# Altium schematic symbol library Orion-Bridge.SchLib: 37 symbols
Pins are listed as number, name and electrical type; pins without a type are passive.

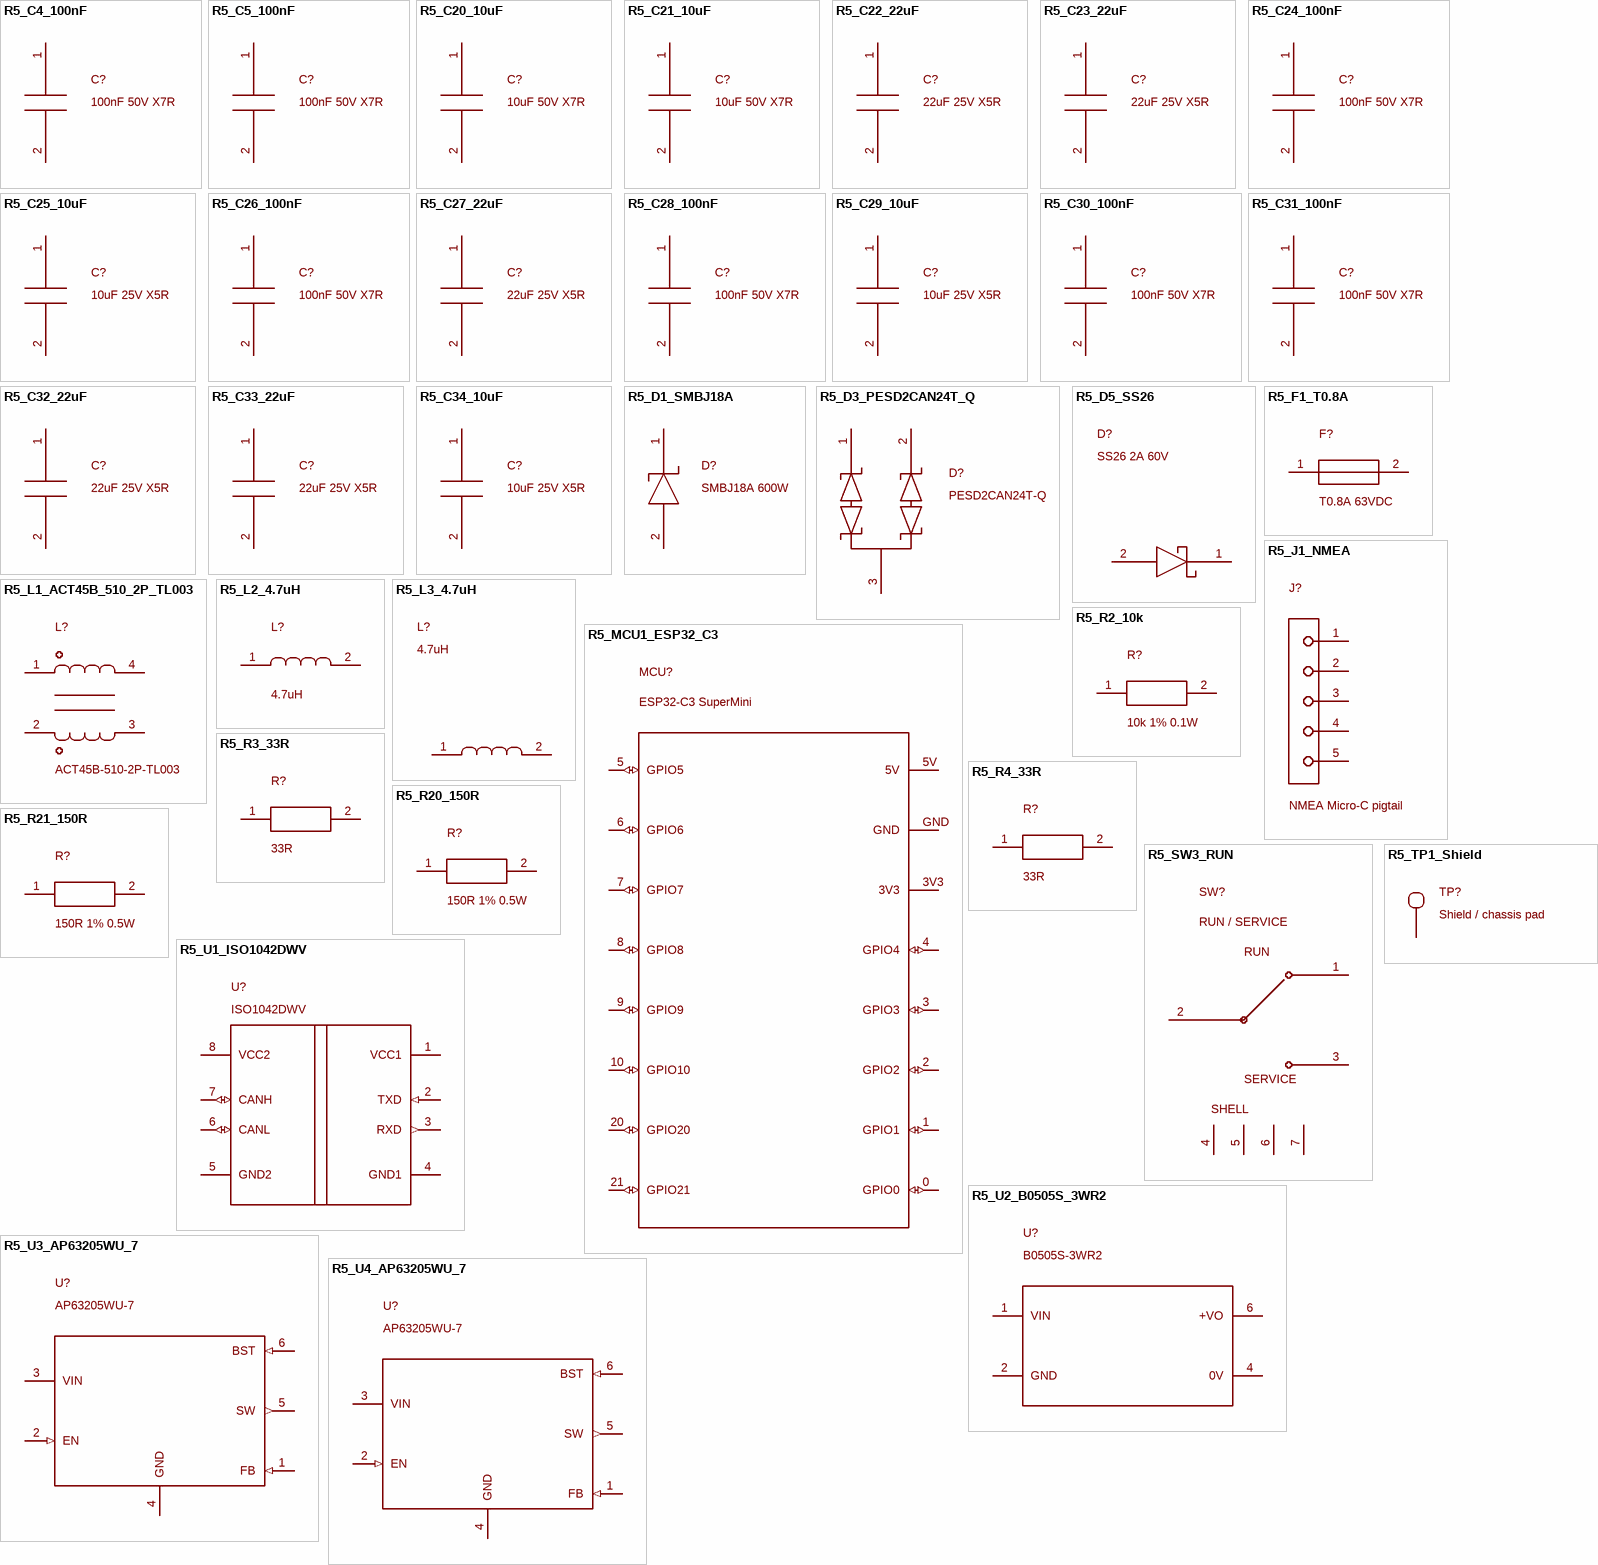
[diagram p0: symbols R5_C4_100nF to R5_U4_AP63205WU_7]

## R5_C4_100nF
designator C?, comment 100nF 50V X7R
100nF 16V X7R - generic specification; manufacturer/MPN not selected; Manufacturer: YAGEO; MPN: CC0603KRX7R9BB104; Manufacturer Part Number: CC0603KRX7R9BB104; Datasheet: https://www.lcsc.com/datasheet/lcsc_datasheet_2211101700_YAGEO-CC0603KRX7R9BB104_C14663.pdf; Supplier 1: LCSC; Supplier Part Number 1: C14663; Footprint Status: R5 placement with enclosure interface
footprint C0603
pins: 1, 2

## R5_C5_100nF
designator C?, comment 100nF 50V X7R
100nF 16V X7R - generic specification; manufacturer/MPN not selected; Manufacturer: YAGEO; MPN: CC0603KRX7R9BB104; Manufacturer Part Number: CC0603KRX7R9BB104; Datasheet: https://www.lcsc.com/datasheet/lcsc_datasheet_2211101700_YAGEO-CC0603KRX7R9BB104_C14663.pdf; Supplier 1: LCSC; Supplier Part Number 1: C14663; Footprint Status: R5 placement with enclosure interface
footprint C0603
pins: 1, 2

## R5_C20_10uF
designator C?, comment 10uF 50V X7R
Manufacturer: Samsung Electro-Mechanics; MPN: CL32B106KBJNNNE; Manufacturer Part Number: CL32B106KBJNNNE; Description: 10uF 50V X7R; Datasheet: https://datasheet.lcsc.com/lcsc/1912112237_Samsung-Electro-Mechanics-CL32B106KBJNNNE_C138687.pdf; Supplier 1: LCSC; Supplier Part Number 1: C138687; Footprint Status: R5 placement with enclosure interface
footprint C1210
pins: 1, 2

## R5_C21_10uF
designator C?, comment 10uF 50V X7R
Manufacturer: Samsung Electro-Mechanics; MPN: CL32B106KBJNNNE; Manufacturer Part Number: CL32B106KBJNNNE; Description: 10uF 50V X7R; Datasheet: https://datasheet.lcsc.com/lcsc/1912112237_Samsung-Electro-Mechanics-CL32B106KBJNNNE_C138687.pdf; Supplier 1: LCSC; Supplier Part Number 1: C138687; Footprint Status: R5 placement with enclosure interface
footprint C1210
pins: 1, 2

## R5_C22_22uF
designator C?, comment 22uF 25V X5R
Manufacturer: Samsung Electro-Mechanics; MPN: CL31A226KAHNNNE; Manufacturer Part Number: CL31A226KAHNNNE; Description: 22uF 25V X5R; Datasheet: https://www.lcsc.com/datasheet/lcsc_datasheet_2304140030_Samsung-Electro-Mechanics-CL31A226KAHNNNE_C12891.pdf; Supplier 1: LCSC; Supplier Part Number 1: C12891; Footprint Status: R5 placement with enclosure interface
footprint C1206
pins: 1, 2

## R5_C23_22uF
designator C?, comment 22uF 25V X5R
Manufacturer: Samsung Electro-Mechanics; MPN: CL31A226KAHNNNE; Manufacturer Part Number: CL31A226KAHNNNE; Description: 22uF 25V X5R; Datasheet: https://www.lcsc.com/datasheet/lcsc_datasheet_2304140030_Samsung-Electro-Mechanics-CL31A226KAHNNNE_C12891.pdf; Supplier 1: LCSC; Supplier Part Number 1: C12891; Footprint Status: R5 placement with enclosure interface
footprint C1206
pins: 1, 2

## R5_C24_100nF
designator C?, comment 100nF 50V X7R
Manufacturer: YAGEO; MPN: CC0603KRX7R9BB104; Manufacturer Part Number: CC0603KRX7R9BB104; Description: 100nF 50V X7R; Datasheet: https://www.lcsc.com/datasheet/lcsc_datasheet_2211101700_YAGEO-CC0603KRX7R9BB104_C14663.pdf; Supplier 1: LCSC; Supplier Part Number 1: C14663; Footprint Status: R5 placement with enclosure interface
footprint C0603
pins: 1, 2

## R5_C25_10uF
designator C?, comment 10uF 25V X5R
Manufacturer: Samsung Electro-Mechanics; MPN: CL21A106KAYNNNE; Manufacturer Part Number: CL21A106KAYNNNE; Description: 10uF 25V X5R; Datasheet: https://www.lcsc.com/datasheet/lcsc_datasheet_2304140030_Samsung-Electro-Mechanics-CL21A106KAYNNNE_C15850.pdf; Supplier 1: LCSC; Supplier Part Number 1: C15850; Footprint Status: R5 placement with enclosure interface
footprint C0805
pins: 1, 2

## R5_C26_100nF
designator C?, comment 100nF 50V X7R
Manufacturer: YAGEO; MPN: CC0603KRX7R9BB104; Manufacturer Part Number: CC0603KRX7R9BB104; Description: 100nF 50V X7R; Datasheet: https://www.lcsc.com/datasheet/lcsc_datasheet_2211101700_YAGEO-CC0603KRX7R9BB104_C14663.pdf; Supplier 1: LCSC; Supplier Part Number 1: C14663; Footprint Status: R5 placement with enclosure interface
footprint C0603
pins: 1, 2

## R5_C27_22uF
designator C?, comment 22uF 25V X5R
Manufacturer: Samsung Electro-Mechanics; MPN: CL31A226KAHNNNE; Manufacturer Part Number: CL31A226KAHNNNE; Description: 22uF 25V X5R; Datasheet: https://www.lcsc.com/datasheet/lcsc_datasheet_2304140030_Samsung-Electro-Mechanics-CL31A226KAHNNNE_C12891.pdf; Supplier 1: LCSC; Supplier Part Number 1: C12891; Footprint Status: R5 placement with enclosure interface
footprint C1206
pins: 1, 2

## R5_C28_100nF
designator C?, comment 100nF 50V X7R
Manufacturer: YAGEO; MPN: CC0603KRX7R9BB104; Manufacturer Part Number: CC0603KRX7R9BB104; Description: 100nF 50V X7R; Datasheet: https://www.lcsc.com/datasheet/lcsc_datasheet_2211101700_YAGEO-CC0603KRX7R9BB104_C14663.pdf; Supplier 1: LCSC; Supplier Part Number 1: C14663; Footprint Status: R5 placement with enclosure interface
footprint C0603
pins: 1, 2

## R5_C29_10uF
designator C?, comment 10uF 25V X5R
Manufacturer: Samsung Electro-Mechanics; MPN: CL21A106KAYNNNE; Manufacturer Part Number: CL21A106KAYNNNE; Description: 10uF 25V X5R; Datasheet: https://www.lcsc.com/datasheet/lcsc_datasheet_2304140030_Samsung-Electro-Mechanics-CL21A106KAYNNNE_C15850.pdf; Supplier 1: LCSC; Supplier Part Number 1: C15850; Footprint Status: R5 placement with enclosure interface
footprint C0805
pins: 1, 2

## R5_C30_100nF
designator C?, comment 100nF 50V X7R
Manufacturer: YAGEO; MPN: CC0603KRX7R9BB104; Manufacturer Part Number: CC0603KRX7R9BB104; Description: 100nF 50V X7R; Datasheet: https://www.lcsc.com/datasheet/lcsc_datasheet_2211101700_YAGEO-CC0603KRX7R9BB104_C14663.pdf; Supplier 1: LCSC; Supplier Part Number 1: C14663; Footprint Status: R5 placement with enclosure interface
footprint C0603
pins: 1, 2

## R5_C31_100nF
designator C?, comment 100nF 50V X7R
Manufacturer: YAGEO; MPN: CC0603KRX7R9BB104; Manufacturer Part Number: CC0603KRX7R9BB104; Description: 100nF 50V X7R; Datasheet: https://www.lcsc.com/datasheet/lcsc_datasheet_2211101700_YAGEO-CC0603KRX7R9BB104_C14663.pdf; Supplier 1: LCSC; Supplier Part Number 1: C14663; Footprint Status: R5 placement with enclosure interface
footprint C0603
pins: 1, 2

## R5_C32_22uF
designator C?, comment 22uF 25V X5R
Manufacturer: Samsung Electro-Mechanics; MPN: CL31A226KAHNNNE; Manufacturer Part Number: CL31A226KAHNNNE; Description: 22uF 25V X5R; Datasheet: https://www.lcsc.com/datasheet/lcsc_datasheet_2304140030_Samsung-Electro-Mechanics-CL31A226KAHNNNE_C12891.pdf; Supplier 1: LCSC; Supplier Part Number 1: C12891; Footprint Status: R5 placement with enclosure interface
footprint C1206
pins: 1, 2

## R5_C33_22uF
designator C?, comment 22uF 25V X5R
Manufacturer: Samsung Electro-Mechanics; MPN: CL31A226KAHNNNE; Manufacturer Part Number: CL31A226KAHNNNE; Description: 22uF 25V X5R; Datasheet: https://www.lcsc.com/datasheet/lcsc_datasheet_2304140030_Samsung-Electro-Mechanics-CL31A226KAHNNNE_C12891.pdf; Supplier 1: LCSC; Supplier Part Number 1: C12891; Footprint Status: R5 placement with enclosure interface
footprint C1206
pins: 1, 2

## R5_C34_10uF
designator C?, comment 10uF 25V X5R
10uF local module5V reservoir after RUN/SERVICE switch; Manufacturer: Samsung Electro-Mechanics; MPN: CL21A106KAYNNNE; Manufacturer Part Number: CL21A106KAYNNNE; Datasheet: https://www.lcsc.com/datasheet/lcsc_datasheet_2304140030_Samsung-Electro-Mechanics-CL21A106KAYNNNE_C15850.pdf; Supplier 1: LCSC; Supplier Part Number 1: C15850; Footprint Status: R5 placement with enclosure interface
footprint C0805
pins: 1, 2

## R5_D1_SMBJ18A
designator D?, comment SMBJ18A 600W
Manufacturer: BORN; MPN: SMBJ18A; Manufacturer Part Number: SMBJ18A; Description: SMBJ18A 600W; Datasheet: https://www.lcsc.com/datasheet/lcsc_datasheet_2304140030_BORN-SMBJ18A_C152104.pdf; Supplier 1: LCSC; Supplier Part Number 1: C152104; Footprint Status: R5 placement with enclosure interface
footprint SMB
pins: 1 K, 2 A

## R5_D3_PESD2CAN24T_Q
designator D?, comment PESD2CAN24T-Q
Manufacturer: Nexperia; MPN: PESD2CAN24T-QR; Manufacturer Part Number: PESD2CAN24T-QR; Description: PESD2CAN24T-Q; Datasheet: https://assets.nexperia.com/documents/data-sheet/PESD2CAN24T-Q.pdf; Supplier 1: LCSC; Supplier Part Number 1: C28933048; Footprint Status: R5 placement with enclosure interface
footprint SOT23_NEXPERIA_REFLOW
pins: 1 K1, 2 K2, 3 CC

## R5_D5_SS26
designator D?, comment SS26 2A 60V
Manufacturer: MDD(Microdiode Semiconductor); MPN: SS26; Manufacturer Part Number: SS26; Description: SS26 2A 60V; Datasheet: https://www.lcsc.com/datasheet/lcsc_datasheet_2407101107_MDD-Microdiode-Semiconductor-SS26_C14238.pdf; Supplier 1: LCSC; Supplier Part Number 1: C14238; Footprint Status: R5 placement with enclosure interface
footprint SMA
pins: 1 K, 2 A

## R5_F1_T0.8A
designator F?, comment T0.8A 63VDC
0.8 A slow-blow SMD ceramic fuse, 63 VDC, 50 A interrupt rating; Manufacturer: BOURNS; MPN: SF-1206S080-2; Manufacturer Part Number: SF-1206S080-2; Datasheet: https://wmsc.lcsc.com/wmsc/upload/file/pdf/v2/lcsc/2304140030_BOURNS-SF-1206S080-2_C3032873.pdf; Supplier 1: LCSC; Supplier Part Number 1: C3032873; Footprint Status: R5 placement with enclosure interface
footprint BOURNS_SF1206S
pins: 1, 2

## R5_J1_NMEA
designator J?, comment NMEA Micro-C pigtail
Five direct wire-solder pads for a separately selected Micro-C cable; this is a PCB interface, not an invented connector MPN or face view; Footprint Status: R5 placement with enclosure interface
footprint PIGTAIL_5_P3_D1P3
pins: 1 SHIELD, 2 NET-S, 3 NET-C, 4 CAN-H, 5 CAN-L

## R5_L1_ACT45B_510_2P_TL003
designator L?, comment ACT45B-510-2P-TL003
Manufacturer: TDK; MPN: ACT45B-510-2P-TL003; Manufacturer Part Number: ACT45B-510-2P-TL003; Description: ACT45B-510-2P-TL003; Datasheet: https://www.lcsc.com/datasheet/lcsc_datasheet_1811151430_TDK-ACT45B-510-2P-TL003_C76584.pdf; Supplier 1: LCSC; Supplier Part Number 1: C76584; Footprint Status: R5 placement with enclosure interface
footprint ACT45B
pins: 1 H_EXT, 2 L_EXT, 3 L_IC, 4 H_IC

## R5_L2_4.7uH
designator L?, comment 4.7uH
Manufacturer: Sunlord; MPN: SWPA4030S4R7MT; Manufacturer Part Number: SWPA4030S4R7MT; Description: 4.7uH; Datasheet: https://www.lcsc.com/datasheet/lcsc_datasheet_2310251551_Sunlord-SWPA4030S4R7MT_C57269.pdf; Supplier 1: LCSC; Supplier Part Number 1: C57269; Footprint Status: R5 placement with enclosure interface
footprint SUNLORD_SWPA4030
pins: 1, 2

## R5_L3_4.7uH
designator L?, comment 4.7uH
Manufacturer: Sunlord; MPN: SWPA4030S4R7MT; Manufacturer Part Number: SWPA4030S4R7MT; Description: 4.7uH; Datasheet: https://www.lcsc.com/datasheet/lcsc_datasheet_2310251551_Sunlord-SWPA4030S4R7MT_C57269.pdf; Supplier 1: LCSC; Supplier Part Number 1: C57269; Footprint Status: R5 placement with enclosure interface
footprint SUNLORD_SWPA4030
pins: 1, 2

## R5_MCU1_ESP32_C3
designator MCU?, comment ESP32-C3 SuperMini
User-selected C3 SuperMini; original onboard USB/BOOT/RESET; direct castellated solder mounting; Manufacturer: Meshnology (seller brand; OEM undisclosed); MPN: ESP32-C3 SuperMini / ASIN B0FN4F6244; Manufacturer Part Number: ESP32-C3 SuperMini / ASIN B0FN4F6244; Datasheet: https://www.amazon.de/4PCS-Supermini-ESP32-C3-Entwicklungsboard/dp/B0FN4F6244; Footprint Status: R5 placement with enclosure interface
footprint SUPERC3_B0FN4F6244_CAST16_SMD
pins: 0 GPIO0 (io), 1 GPIO1 (io), 2 GPIO2 (io), 3 GPIO3 (io), 3V3 (power), 4 GPIO4 (io), 5 GPIO5 (io), 5V (power), 6 GPIO6 (io), 7 GPIO7 (io), 8 GPIO8 (io), 9 GPIO9 (io), 10 GPIO10 (io), 20 GPIO20 (io), 21 GPIO21 (io), GND (power)

## R5_R2_10k
designator R?, comment 10k 1% 0.1W
10k - generic specification; manufacturer/MPN not selected; Manufacturer: UNI-ROYAL(Uniroyal Elec); MPN: 0603WAF1002T5E; Manufacturer Part Number: 0603WAF1002T5E; Datasheet: https://www.lcsc.com/datasheet/lcsc_datasheet_2206010045_UNI-ROYAL-Uniroyal-Elec-0603WAF1002T5E_C25804.pdf; Supplier 1: LCSC; Supplier Part Number 1: C25804; Footprint Status: R5 placement with enclosure interface
footprint R0603
pins: 1, 2

## R5_R3_33R
designator R?, comment 33R
33R - generic specification; manufacturer/MPN not selected; Manufacturer: UNI-ROYAL(Uniroyal Elec); MPN: 0603WAF330JT5E; Manufacturer Part Number: 0603WAF330JT5E; Datasheet: https://www.lcsc.com/datasheet/lcsc_datasheet_2206010116_UNI-ROYAL-Uniroyal-Elec-0603WAF330JT5E_C23140.pdf; Supplier 1: LCSC; Supplier Part Number 1: C23140; Footprint Status: R5 placement with enclosure interface
footprint R0603
pins: 1, 2

## R5_R4_33R
designator R?, comment 33R
33R - generic specification; manufacturer/MPN not selected; Manufacturer: UNI-ROYAL(Uniroyal Elec); MPN: 0603WAF330JT5E; Manufacturer Part Number: 0603WAF330JT5E; Datasheet: https://www.lcsc.com/datasheet/lcsc_datasheet_2206010116_UNI-ROYAL-Uniroyal-Elec-0603WAF330JT5E_C23140.pdf; Supplier 1: LCSC; Supplier Part Number 1: C23140; Footprint Status: R5 placement with enclosure interface
footprint R0603
pins: 1, 2

## R5_R20_150R
designator R?, comment 150R 1% 0.5W
Manufacturer: SEI(Stackpole Elec); MPN: RNCP1206FTD150R; Manufacturer Part Number: RNCP1206FTD150R; Description: 150R 1% 0.5W; Datasheet: https://wmsc.lcsc.com/wmsc/upload/file/pdf/v2/lcsc/2404111532_SEI-Stackpole-Elec-RNCP1206FTD150R_C4258541.pdf; Supplier 1: LCSC; Supplier Part Number 1: C4258541; Footprint Status: R5 placement with enclosure interface
footprint R1206
pins: 1, 2

## R5_R21_150R
designator R?, comment 150R 1% 0.5W
Manufacturer: SEI(Stackpole Elec); MPN: RNCP1206FTD150R; Manufacturer Part Number: RNCP1206FTD150R; Description: 150R 1% 0.5W; Datasheet: https://wmsc.lcsc.com/wmsc/upload/file/pdf/v2/lcsc/2404111532_SEI-Stackpole-Elec-RNCP1206FTD150R_C4258541.pdf; Supplier 1: LCSC; Supplier Part Number 1: C4258541; Footprint Status: R5 placement with enclosure interface
footprint R1206
pins: 1, 2

## R5_SW3_RUN
designator SW?, comment RUN / SERVICE
Side-actuated SPDT service supply disconnect, 1A at6V, original SuperMini USB service; Manufacturer: G-Switch; MPN: MK-12C02-G020; Manufacturer Part Number: MK-12C02-G020; Datasheet: https://static.chipdip.ru/lib/011/DOC043011829.pdf; Supplier 1: LCSC; Supplier Part Number 1: C963206; Footprint Status: R5 placement with enclosure interface
footprint GSWITCH_MK12C02_G020
pins: 1 RUN_IN, 2 COMMON, 3 SERVICE_NC, 4 SHIELD1, 5 SHIELD2, 6 SHIELD3, 7 SHIELD4
text: RUN; SERVICE; SHELL

## R5_TP1_Shield
designator TP?, comment Shield / chassis pad
Shield / chassis pad - generic specification; manufacturer/MPN not selected; Footprint Status: R5 placement with enclosure interface
footprint TESTPOINT_2MM
pins: 1 SHIELD

## R5_U1_ISO1042DWV
designator U?, comment ISO1042DWV
Manufacturer: Texas Instruments; MPN: ISO1042DWVR; Manufacturer Part Number: ISO1042DWVR; Description: ISO1042DWV; Datasheet: https://datasheet.lcsc.com/lcsc/2302212001_Texas-Instruments-ISO1042DWVR_C2671714.pdf; Supplier 1: LCSC; Supplier Part Number 1: C2671714; Footprint Status: R5 placement with enclosure interface
footprint SOIC8_DWV
pins: 1 VCC1 (power), 2 TXD (in), 3 RXD (out), 4 GND1 (power), 5 GND2 (power), 6 CANL (io), 7 CANH (io), 8 VCC2 (power)

## R5_U2_B0505S_3WR2
designator U?, comment B0505S-3WR2
Manufacturer: EVISUN; MPN: B0505S-3WR2; Manufacturer Part Number: B0505S-3WR2; Description: B0505S-3WR2; Datasheet: https://wmsc.lcsc.com/wmsc/upload/file/pdf/v2/lcsc/2308311627_EVISUN-B0505S-3WR2_C7500927.pdf; Supplier 1: LCSC; Supplier Part Number 1: C7500927; Footprint Status: R5 placement with enclosure interface
footprint EVISUN_B0505S_3WR2
pins: 1 VIN (power), 2 GND (power), 4 0V (power), 6 +VO (power)

## R5_U3_AP63205WU_7
designator U?, comment AP63205WU-7
Manufacturer: Diodes Incorporated; MPN: AP63205WU-7; Manufacturer Part Number: AP63205WU-7; Description: AP63205WU-7; Datasheet: https://www.lcsc.com/datasheet/lcsc_datasheet_2210280930_Diodes-Incorporated-AP63205WU-7_C2071056.pdf; Supplier 1: LCSC; Supplier Part Number 1: C2071056; Footprint Status: R5 placement with enclosure interface
footprint TSOT26_DIODES
pins: 1 FB (in), 2 EN (in), 3 VIN (power), 4 GND (power), 5 SW (out), 6 BST (in)

## R5_U4_AP63205WU_7
designator U?, comment AP63205WU-7
Isolated-side 5V buck / high-duty pass-through, feeding physical RUN/SERVICE disconnect; Manufacturer: Diodes Incorporated; MPN: AP63205WU-7; Manufacturer Part Number: AP63205WU-7; Datasheet: https://www.lcsc.com/datasheet/lcsc_datasheet_2210280930_Diodes-Incorporated-AP63205WU-7_C2071056.pdf; Supplier 1: LCSC; Supplier Part Number 1: C2071056; Footprint Status: R5 placement with enclosure interface
footprint TSOT26_DIODES
pins: 1 FB (in), 2 EN (in), 3 VIN (power), 4 GND (power), 5 SW (out), 6 BST (in)